# EAGLE library part GEVCU7 (library F-E library custom components)
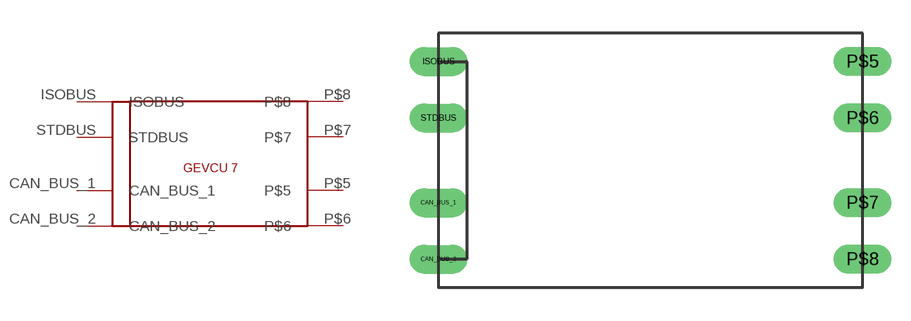
[diagram p0: symbol with the pads of GEVCU7FP; footprint GEVCU7FP]

Designator prefix -

## GEVCU7THROUGHHOLE  [GEVCU7FP]
CAN_BUS_1  CAN_BUS_1
CAN_BUS_2  CAN_BUS_2
ISOBUS  ISOBUS
P$5  P$5
P$6  P$6
P$7  P$7
P$8  P$8
STDBUS  STDBUS

## Footprint GEVCU7FP (pad centres in mm)
drill 0.8 long: CAN_BUS_1 0,3.81; CAN_BUS_2 0,1.27; ISOBUS 0,10.16; P$5 19.05,10.16; P$6 19.05,7.62; P$7 19.05,3.81; P$8 19.05,1.27; STDBUS 0,7.62